# Altium integrated library Tony_Library.IntLib: 178 symbols (part 6 of 6)
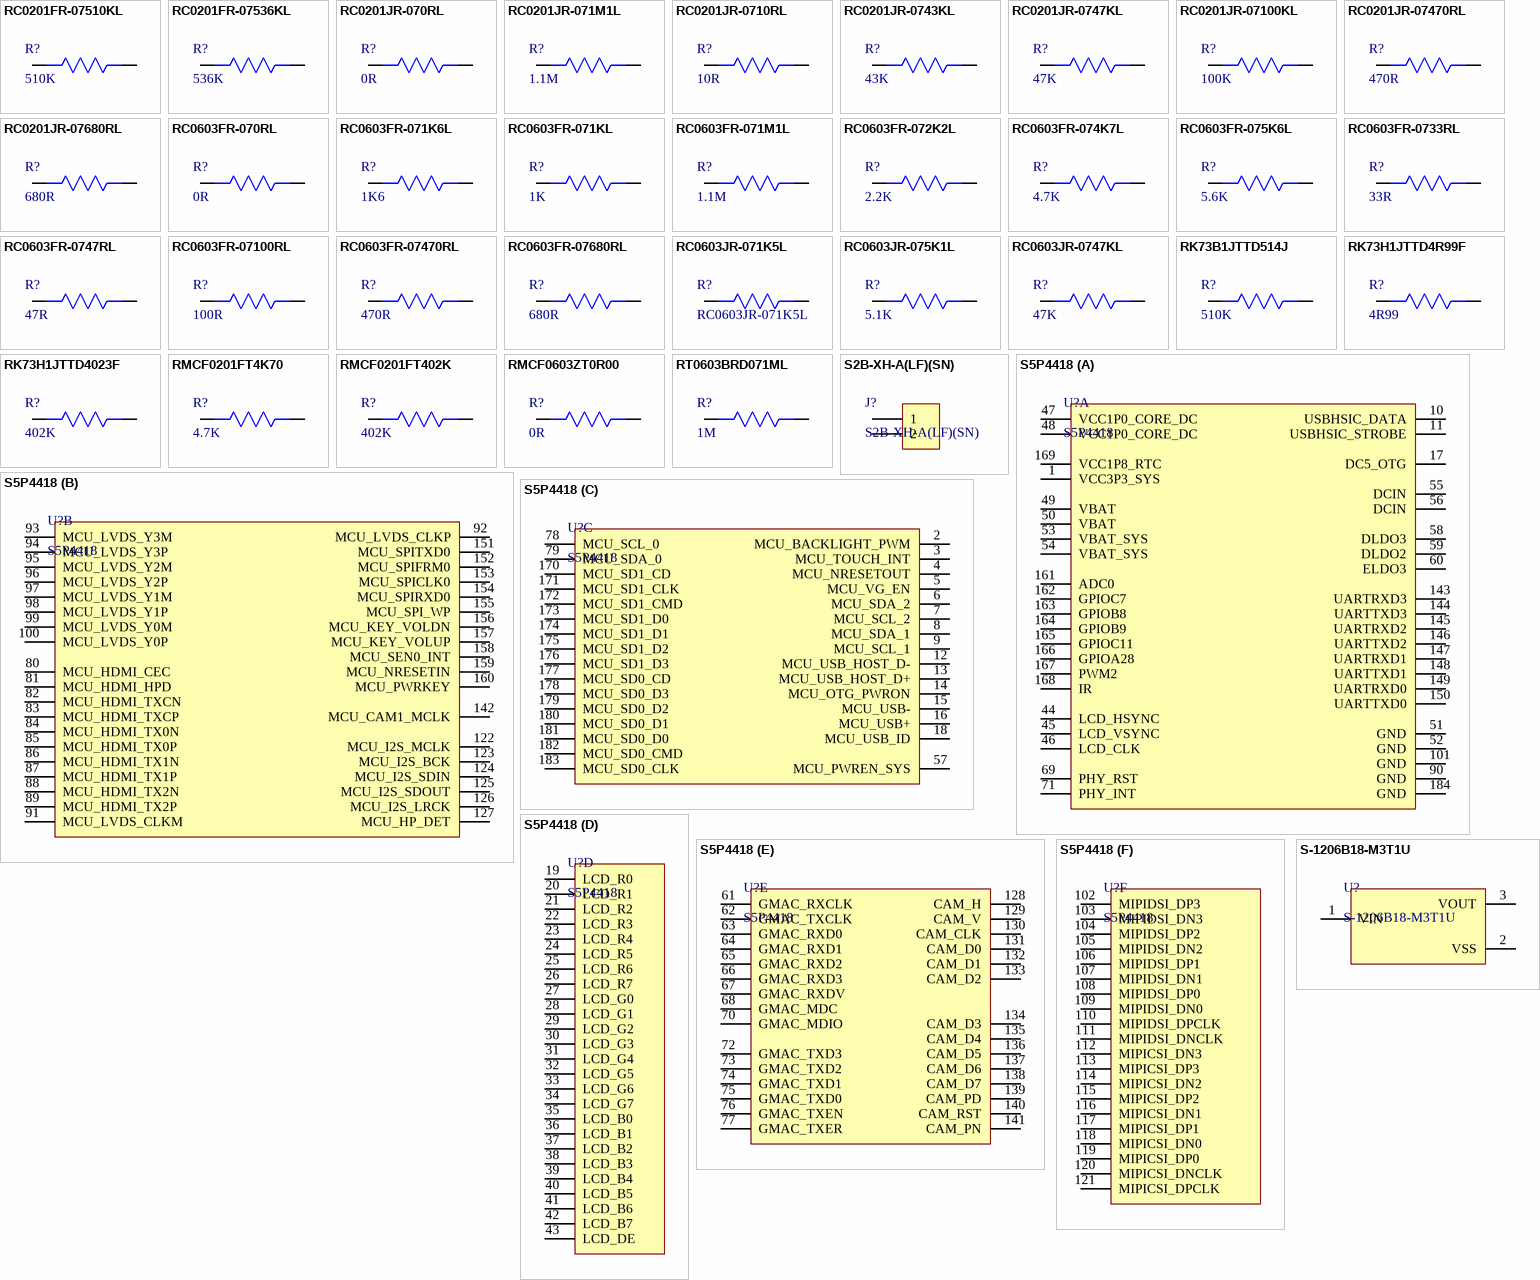
[diagram p9: symbols RC0201FR-07510KL to S-1206B18-M3T1U]

## RMCF0201FT402K
designator R?, comment 402K
RES 402K OHM 1% 1/20W 0201; Manufacturer: Stackpole Electronics; Manufacturer Part Number: RMCF0201FT402K; Resistance: 402kR; Max Power Dissipation: 50mW; Temperature Coefficient: 200ppm/°C; Supplier 1: Digi-Key; RoHS: Yes; Category: Chip SMD Resistors; Stock 1: 4361; Pricing 1: 1=0.10000, 10=0.02700, 100=0.01090, 1000=0.00488, 2500=0.00423, 5000=0.00350 (USD); Mount: Surface Mount; Case/Package: 0201; Case Code (Metric): 0603; Case Code (Imperial): 0201; Contact Plating: Tin,Matte; Min Operating Temperature: -55°C; Max Operating Temperature: 125°C; Packaging: Tape and Reel; Tolerance: 1%; Resistor Type: Thick Film; Number of Terminations: 2; Series: RMCF; Length: 0.024inch; Width: 0.012inch; Height: 0.009inch; Radiation Hardening: No; RoHS Compliant: Yes; ComponentLink1URL: https://www.seielect.com/catalog/SEI-RMCF_RMCP.pdf?src-supplier=Avnet; ComponentLink1Description: https://www.seielect.com/catalog/SEI-RMCF_RMCP.pdf?src-supplier=Avnet; ComponentLink2URL: https://www.seielect.com/Catalog/SEI-RMCF_RMCP.pdf?src-supplier=Digi-Key; ComponentLink2Description: https://www.seielect.com/Catalog/SEI-RMCF_RMCP.pdf?src-supplier=Digi-Key; Supplier Part Number 1: RMCF0201FT402KCT-ND
footprint Res-0201
pins: 1, 2

## RMCF0603ZT0R00
designator R?, comment 0R
RES 0 OHM JUMPER 1/10W 0603; Manufacturer: Stackpole Electronics; Manufacturer Part Number: RMCF0603ZT0R00; Power Rating: 100mW; Current Rating: 1A; Working Voltage: 75V; Supplier 1: Digi-Key; RoHS: Yes; Category: Chip SMD Resistors; Stock 1: 9998033; Pricing 1: 1=0.10000, 10=0.01300, 25=0.00960, 50=0.00720, 100=0.00530, 250=0.00404, 500=0.00324, 1000=0.00238 (USD); Mount: Surface Mount; Case/Package: 0603; Case Code (Metric): 1608; Case Code (Imperial): 0603; Contact Plating: Tin,Matte; Min Operating Temperature: -55°C; Max Operating Temperature: 155°C; Resistance: 0R; Packaging: Tape and Reel; Resistor Type: Thick Film; Number of Terminations: 2; Max Power Dissipation: 100mW; Features: Automotive AEC-Q200; Series: RMCF; Construction: Rectangular; Length: 1.55mm; Width: 0.031inch; Height: 0.022inch; Depth: 0.8mm; Radiation Hardening: No; Lead Free: Lead Free; Military Standard: Not; RoHS Compliant: Yes; ComponentLink1URL: https://www.seielect.com/catalog/SEI-Packaging.pdf?src-supplier=Avnet; ComponentLink1Description: https://www.seielect.com/catalog/SEI-Packaging.pdf?src-supplier=Avnet; ComponentLink2URL: https://www.seielect.com/catalog/SEI-Packaging.pdf?src-supplier=Verical; ComponentLink2Description: https://www.seielect.com/catalog/SEI-Packaging.pdf?src-supplier=Verical; ComponentLink3URL: https://www.seielect.com/catalog/SEI-Packaging.pdf?src-supplier=Digi-Key; ComponentLink3Description: https://www.seielect.com/catalog/SEI-Packaging.pdf?src-supplier=Digi-Key; ComponentLink4URL: https://www.seielect.com/Catalog/SEI-RMCF_RMCP.pdf?src-supplier=Digi-Key; ComponentLink4Description: https://www.seielect.com/Catalog/SEI-RMCF_RMCP.pdf?src-supplier=Digi-Key; ComponentLink5URL: https://www.seielect.com/catalog/SEI-Packaging.pdf?src-supplier=Arrow+Electronics; ComponentLink5Description: https://www.seielect.com/catalog/SEI-Packaging.pdf?src-supplier=Arrow+Electronics; Supplier Part Number 1: RMCF0603ZT0R00CT-ND
footprint Res0603
pins: 1, 2

## RT0603BRD071ML
designator R?, comment 1M
RES SMD 1M OHM 0.1% 1/10W 0603; Manufacturer: Yageo; Manufacturer Part Number: RT0603BRD071ML; Resistance: 1MR; Max Power Dissipation: 100mW; Temperature Coefficient: 25ppm/°C; Supplier 1: Digi-Key; Stock 1: 45971; Pricing 1: 1=0.3, 10=0.254, 100=0.0991, 1000=0.04149, 2500=0.03803 (USD); Case/Package: 0603; Min Operating Temperature: -55°C; Max Operating Temperature: 155°C; Packaging: Tape and Reel; Resistor Type: Thin Film; Number of Terminations: 2; Tolerance: 0.1%; Features: Moisture Resistant; Length: 0.063inch; Width: 0.031inch; Height: 0.022inch; RoHS Compliant: Yes; ComponentLink1URL: http://www.yageo.com/documents/recent/PYu-RT_1-to-0.01_RoHS_L_9.pdf?src-supplier=Digi-Key; ComponentLink1Description: http://www.yageo.com/documents/recent/PYu-RT_1-to-0.01_RoHS_L_9.pdf?src-supplier=Digi-Key; Supplier Part Number 1: YAG4498DKR-ND
footprint Res0603
pins: 1, 2

## S2B-XH-A(LF)(SN)
designator J?
CONN HEADER R/A 2POS 2.5MM; Manufacturer: JST; Current Rating: 3A; Contact Resistance: 20mR; Voltage Rating (AC): 250V; Number of Positions: 2; Insulation Resistance: 1GR; Gender: Male; Connector Type: Male Pin; Wire/Cable Gauge: 22AWG; Supplier 1: Digi-Key; Manufacturer Part Number: S2B-XH-A(LF)(SN); RoHS: Yes; Category: Headers and Wire Housings; Stock 1: 44898; Pricing 1: 1=0.17000, 10=0.16200, 100=0.11260, 500=0.09524, 1000=0.07792, 5000=0.06927, 10000=0.06277 (USD); Mount: Through Hole; Contact Material: Brass; Contact Plating: Tin,Copper,Lead; Color: Natural; Housing Color: White; Housing Material: Polyamide; Min Operating Temperature: -25°C; Max Operating Temperature: 85°C; Number of Rows: 1; Voltage Rating: 250V; Termination: Press-Fit; Number of Contacts: 2; Max Current Rating: 3A; Package Quantity: 1000; Packaging: Bulk; Max Voltage Rating (AC): 250V; Max Voltage Rating (DC): 250V; Orientation: Right Angle; Length: 7.4mm; Pitch: 2.5mm; Lead Pitch: 2.5mm; Depth: 11.5mm; REACH SVHC: No SVHC; Lead Free: Lead Free; ComponentLink1URL: https://datasheet.ciiva.com/16208/s2b-xh-alfsn-16208978.pdf?src-supplier=Future+Electronics; ComponentLink1Description: https://datasheet.ciiva.com/16208/s2b-xh-alfsn-16208978.pdf?src-supplier=Future+Electronics; ComponentLink2URL: https://datasheet.ciiva.com/8052/1684882-8052211.pdf?src-supplier=Element14; ComponentLink2Description: https://datasheet.ciiva.com/8052/1684882-8052211.pdf?src-supplier=Element14; ComponentLink3URL: https://datasheet.ciiva.com/11746/0900766b8082f560-11746947.pdf?src-supplier=RSComponents; ComponentLink3Description: https://datasheet.ciiva.com/11746/0900766b8082f560-11746947.pdf?src-supplier=RSComponents; ComponentLink4URL: https://datasheet.ciiva.com/26894/getdatasheetpartid-640270-26894603.pdf?src-supplier=Verical; ComponentLink4Description: https://datasheet.ciiva.com/26894/getdatasheetpartid-640270-26894603.pdf?src-supplier=Verical; ComponentLink5URL: https://datasheet.ciiva.com/26924/getdatasheetpartid-645395-26924076.pdf?src-supplier=Verical; ComponentLink5Description: https://datasheet.ciiva.com/26924/getdatasheetpartid-645395-26924076.pdf?src-supplier=Verical; ComponentLink6URL: https://datasheet.ciiva.com/26894/getdatasheetpartid-441330-26894909.pdf?src-supplier=Verical; ComponentLink6Description: https://datasheet.ciiva.com/26894/getdatasheetpartid-441330-26894909.pdf?src-supplier=Verical; ComponentLink7URL: https://datasheet.ciiva.com/726/exh-726412.pdf?src-supplier=Digi-Key; ComponentLink7Description: https://datasheet.ciiva.com/726/exh-726412.pdf?src-supplier=Digi-Key; ComponentLink8URL: https://datasheet.ciiva.com/20207/523653-20207183.pdf?src-supplier=Rapid+Electronics; ComponentLink8Description: https://datasheet.ciiva.com/20207/523653-20207183.pdf?src-supplier=Rapid+Electronics; Supplier Part Number 1: 455-2257-ND
footprint S2B-XH-A(LF)(SN)
pins: 1, 2

## S5P4418
designator U?
S5P4418 Quad Core Android SoM System on Module; Manufacturer: Samsung; Value: Custom; Manufacturer Part No: S5P4418; Package: Custom
footprint S5P4418
part A pins: 1 VCC3P3_SYS, 10 USBHSIC_DATA, 11 USBHSIC_STROBE, 17 DC5_OTG, 44 LCD_HSYNC, 45 LCD_VSYNC, 46 LCD_CLK, 47 VCC1P0_CORE_DC, 48 VCC1P0_CORE_DC, 49 VBAT, 50 VBAT, 51 GND, 52 GND, 53 VBAT_SYS, 54 VBAT_SYS, 55 DCIN, 56 DCIN, 58 DLDO3, 59 DLDO2, 60 ELDO3, 69 PHY_RST, 71 PHY_INT, 90 GND, 101 GND, 143 UARTRXD3, 144 UARTTXD3, 145 UARTRXD2, 146 UARTTXD2, 147 UARTRXD1, 148 UARTTXD1, 149 UARTRXD0, 150 UARTTXD0, 161 ADC0, 162 GPIOC7, 163 GPIOB8, 164 GPIOB9, 165 GPIOC11, 166 GPIOA28, 167 PWM2, 168 IR, 169 VCC1P8_RTC, 184 GND
part B pins: 80 MCU_HDMI_CEC, 81 MCU_HDMI_HPD, 82 MCU_HDMI_TXCN, 83 MCU_HDMI_TXCP, 84 MCU_HDMI_TX0N, 85 MCU_HDMI_TX0P, 86 MCU_HDMI_TX1N, 87 MCU_HDMI_TX1P, 88 MCU_HDMI_TX2N, 89 MCU_HDMI_TX2P, 91 MCU_LVDS_CLKM, 92 MCU_LVDS_CLKP, 93 MCU_LVDS_Y3M, 94 MCU_LVDS_Y3P, 95 MCU_LVDS_Y2M, 96 MCU_LVDS_Y2P, 97 MCU_LVDS_Y1M, 98 MCU_LVDS_Y1P, 99 MCU_LVDS_Y0M, 100 MCU_LVDS_Y0P, 122 MCU_I2S_MCLK, 123 MCU_I2S_BCK, 124 MCU_I2S_SDIN, 125 MCU_I2S_SDOUT, 126 MCU_I2S_LRCK, 127 MCU_HP_DET, 142 MCU_CAM1_MCLK, 151 MCU_SPITXD0, 152 MCU_SPIFRM0, 153 MCU_SPICLK0, 154 MCU_SPIRXD0, 155 MCU_SPI_WP, 156 MCU_KEY_VOLDN, 157 MCU_KEY_VOLUP, 158 MCU_SEN0_INT, 159 MCU_NRESETIN, 160 MCU_PWRKEY
part C pins: 2 MCU_BACKLIGHT_PWM, 3 MCU_TOUCH_INT, 4 MCU_NRESETOUT, 5 MCU_VG_EN, 6 MCU_SDA_2, 7 MCU_SCL_2, 8 MCU_SDA_1, 9 MCU_SCL_1, 12 MCU_USB_HOST_D-, 13 MCU_USB_HOST_D+, 14 MCU_OTG_PWRON, 15 MCU_USB-, 16 MCU_USB+, 18 MCU_USB_ID, 57 MCU_PWREN_SYS, 78 MCU_SCL_0, 79 MCU_SDA_0, 170 MCU_SD1_CD, 171 MCU_SD1_CLK, 172 MCU_SD1_CMD, 173 MCU_SD1_D0, 174 MCU_SD1_D1, 175 MCU_SD1_D2, 176 MCU_SD1_D3, 177 MCU_SD0_CD, 178 MCU_SD0_D3, 179 MCU_SD0_D2, 180 MCU_SD0_D1, 181 MCU_SD0_D0, 182 MCU_SD0_CMD, 183 MCU_SD0_CLK
part D pins: 19 LCD_R0, 20 LCD_R1, 21 LCD_R2, 22 LCD_R3, 23 LCD_R4, 24 LCD_R5, 25 LCD_R6, 26 LCD_R7, 27 LCD_G0, 28 LCD_G1, 29 LCD_G2, 30 LCD_G3, 31 LCD_G4, 32 LCD_G5, 33 LCD_G6, 34 LCD_G7, 35 LCD_B0, 36 LCD_B1, 37 LCD_B2, 38 LCD_B3, 39 LCD_B4, 40 LCD_B5, 41 LCD_B6, 42 LCD_B7, 43 LCD_DE
part E pins: 61 GMAC_RXCLK, 62 GMAC_TXCLK, 63 GMAC_RXD0, 64 GMAC_RXD1, 65 GMAC_RXD2, 66 GMAC_RXD3, 67 GMAC_RXDV, 68 GMAC_MDC, 70 GMAC_MDIO, 72 GMAC_TXD3, 73 GMAC_TXD2, 74 GMAC_TXD1, 75 GMAC_TXD0, 76 GMAC_TXEN, 77 GMAC_TXER, 128 CAM_H, 129 CAM_V, 130 CAM_CLK, 131 CAM_D0, 132 CAM_D1, 133 CAM_D2, 134 CAM_D3, 135 CAM_D4, 136 CAM_D5, 137 CAM_D6, 138 CAM_D7, 139 CAM_PD, 140 CAM_RST, 141 CAM_PN
part F pins: 102 MIPIDSI_DP3, 103 MIPIDSI_DN3, 104 MIPIDSI_DP2, 105 MIPIDSI_DN2, 106 MIPIDSI_DP1, 107 MIPIDSI_DN1, 108 MIPIDSI_DP0, 109 MIPIDSI_DN0, 110 MIPIDSI_DPCLK, 111 MIPIDSI_DNCLK, 112 MIPICSI_DN3, 113 MIPICSI_DP3, 114 MIPICSI_DN2, 115 MIPICSI_DP2, 116 MIPICSI_DN1, 117 MIPICSI_DP1, 118 MIPICSI_DN0, 119 MIPICSI_DP0, 120 MIPICSI_DNCLK, 121 MIPICSI_DPCLK

## S-1206B18-M3T1U
designator U?
IC REG LINEAR 1.8V 250MA SOT23-3; Manufacturer: ABLIC; Supplier 1: Digi-Key; Manufacturer Part Number: S-1206B18-M3T1U; Stock 1: 577; Pricing 1: 1=0.92000, 10=0.80800, 25=0.75960, 100=0.57580, 250=0.49000, 500=0.46550 (USD); Supplier Part Number 1: 1662-1438-1-ND
footprint SOT-23 (TRANS NPN 40V 0.6A SOT23)
pins: 1 VIN, 2 VSS, 3 VOUT

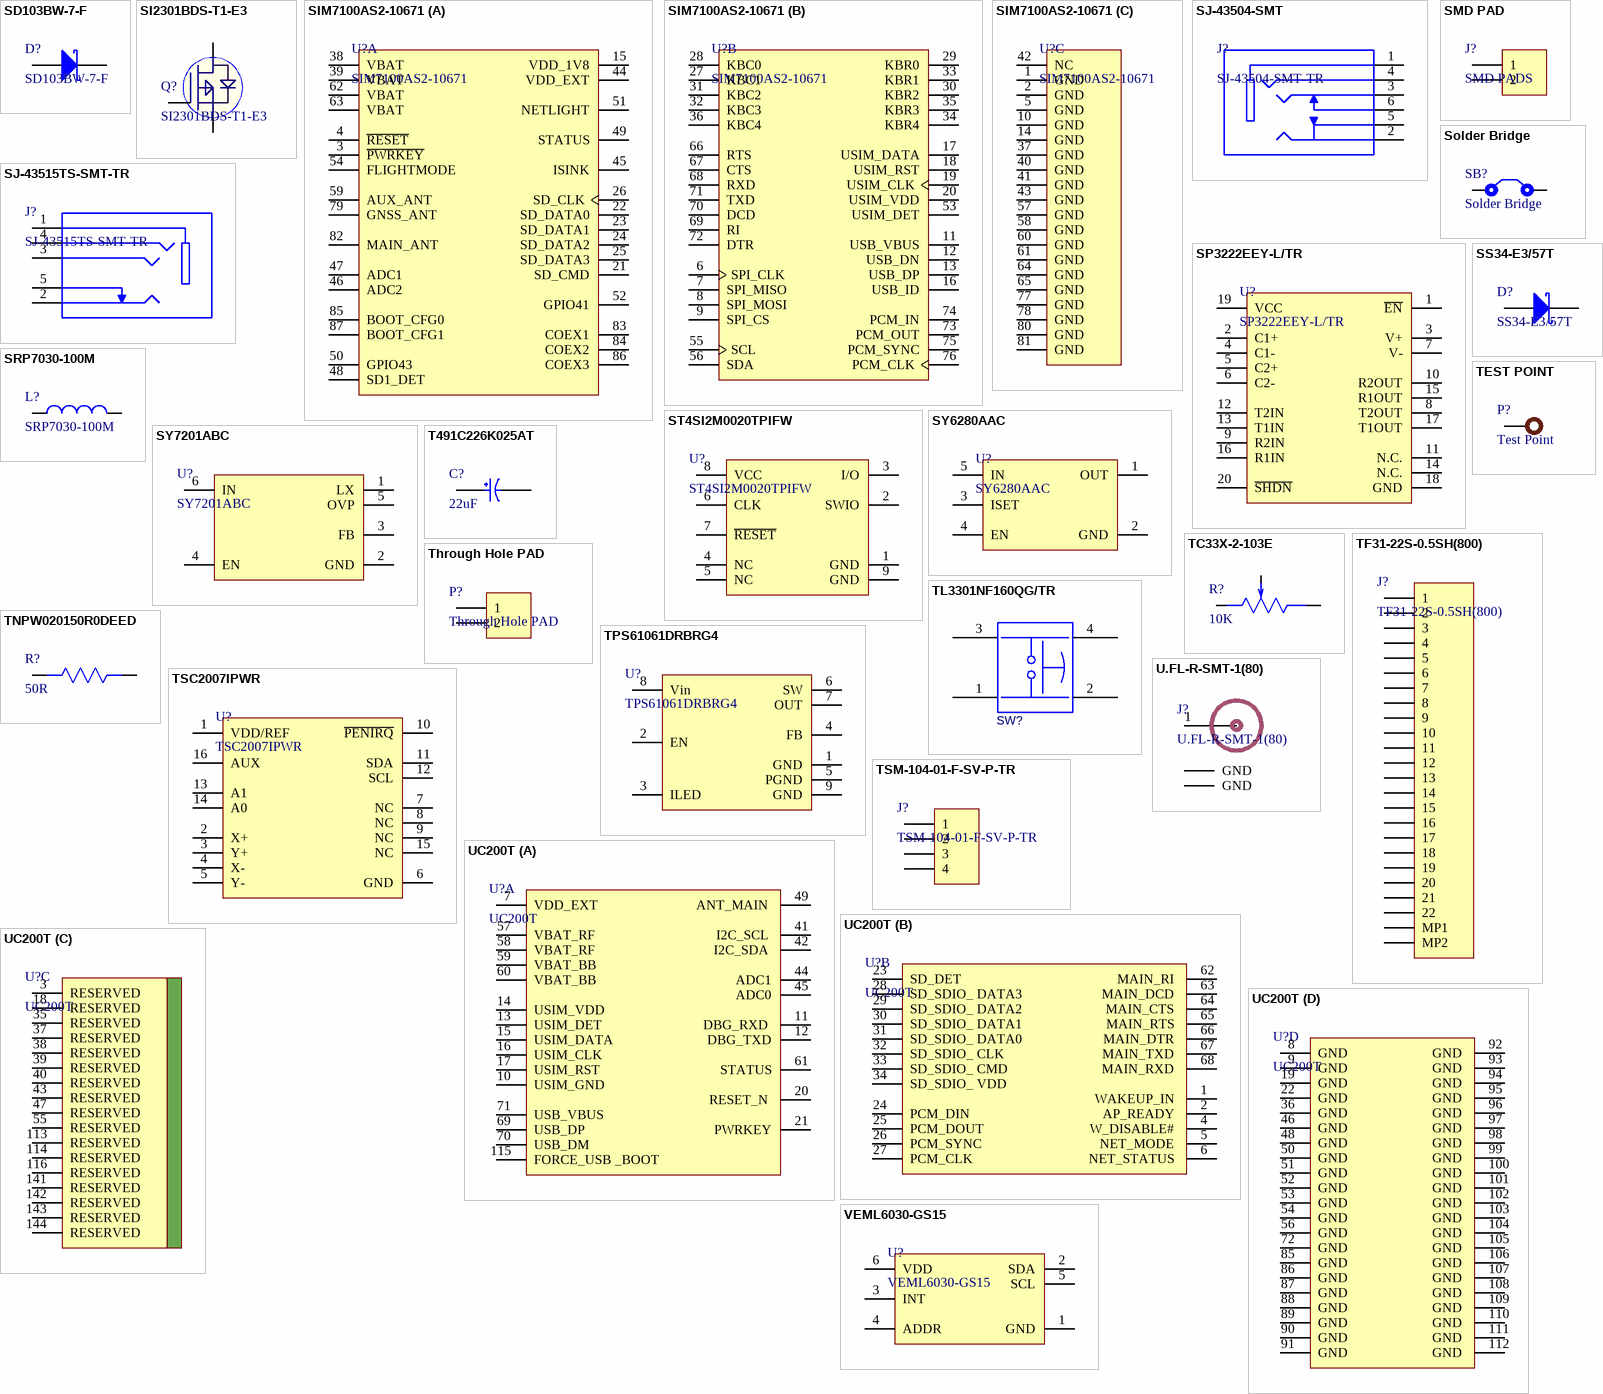
[diagram p4: symbols SD103BW-7-F to VEML6030-GS15]

## SD103BW-7-F
designator D?
Diode Schottky 30V 0.35A 2-Pin SOD-123 T/R; Manufacturer: Diodes; Forward Current: 350mA; Peak Non-Repetitive Surge Current: 1.5A; Element Configuration: Single; Forward Voltage: 600mV; Max Power Dissipation: 400mW; Reverse Recovery Time: 10ns; Max Reverse Current: 5uA; Supplier 1: Digi-Key; Manufacturer Part Number: SD103BW-7-F; RoHS: Yes; Category: Rectifier Diodes; Stock 1: 2033; Pricing 1: 1=0.44000, 10=0.32400, 100=0.18340, 500=0.12144, 1000=0.09310 (USD); Mount: Surface Mount; Number of Pins: 2; Weight: 0.000353oz; Min Operating Temperature: -65°C; Max Operating Temperature: 125°C; Max Repetitive Reverse Voltage (Vrrm): 30V; Package Quantity: 3000; Packaging: Tape and Reel; Average Rectified Current: 350mA; Power Dissipation: 400mW; Max Forward Surge Current (Ifsm): 1.5A; Termination: SMD/SMT; Power Rating: 400mW; Max Reverse Voltage (DC): 30V; Series: -; Length: 2.85mm; Width: 1.7mm; Height: 1.25mm; Radiation Hardening: No; REACH SVHC: No SVHC; Lead Free: Lead Free; RoHS Compliant: Yes; ComponentLink1URL: https://datasheet.ciiva.com/36526/1541925-36526008.pdf?src-supplier=Jameco; ComponentLink1Description: https://datasheet.ciiva.com/36526/1541925-36526008.pdf?src-supplier=Jameco; ComponentLink2URL: https://datasheet.ciiva.com/912/ds11013-912934.pdf?src-supplier=Digi-Key; ComponentLink2Description: https://datasheet.ciiva.com/912/ds11013-912934.pdf?src-supplier=Digi-Key; ComponentLink3URL: https://datasheet.ciiva.com/912/ds11013-912935.pdf?src-supplier=Digi-Key; ComponentLink3Description: https://datasheet.ciiva.com/912/ds11013-912935.pdf?src-supplier=Digi-Key; ComponentLink4URL: https://datasheet.ciiva.com/16574/ds11013-16574365.pdf?src-supplier=Avnet+Europe; ComponentLink4Description: https://datasheet.ciiva.com/16574/ds11013-16574365.pdf?src-supplier=Avnet+Europe; ComponentLink5URL: https://datasheet.ciiva.com/22695/480042-22695847.pdf?src-supplier=Element14; ComponentLink5Description: https://datasheet.ciiva.com/22695/480042-22695847.pdf?src-supplier=Element14; ComponentLink6URL: https://datasheet.ciiva.com/7964/ds11013-7964329.pdf?src-supplier=Element14; ComponentLink6Description: https://datasheet.ciiva.com/7964/ds11013-7964329.pdf?src-supplier=Element14; Supplier Part Number 1: SD103BW-7-FDICT-ND
footprint SOD-123
pins: 1 K, 2 A

## SI2301BDS-T1-E3
designator Q?
MOSFET 20V 2.0A 0.9W; Manufacturer: Vishay; Manufacturer Part Number: SI2301BDST1E3; Nominal Vgs: -950mV; Rds On Max: 100mR; Input Capacitance: 375pF; Rise Time: 40ns; Number of Elements: 1; Max Power Dissipation: 900mW; Continuous Drain Current (ID): 2.4A; Gate to Source Voltage (Vgs): 4.5V; Fall Time: 20ns; Turn-Off Delay Time: 30ns; Power Dissipation: 700mW; Element Configuration: Single; Drain to Source Breakdown Voltage: -20V; Polarity: P-CHANNEL; Supplier 1: Digi-Key; RoHS: Yes; Category: MOSFETs; Stock 1: 51394; Pricing 1: 1=0.42000, 10=0.34100, 100=0.23230, 500=0.17424, 1000=0.13068 (USD); Mount: Surface Mount; Case/Package: SOT-23-3; Number of Pins: 3; Weight: 0.000282oz; Contact Plating: Tin,Matte; Min Operating Temperature: -55°C; Max Operating Temperature: 150°C; Package Quantity: 3000; Packaging: Cut Tape; Drain to Source Voltage (Vdss): 20V; Drain to Source Resistance: 100mR; Threshold Voltage: -950mV; Turn-On Delay Time: 20ns; Number of Channels: 1; On-State Resistance: 100MR; Series: SI2; Length: 2.9mm; Width: 1.6mm; Height: 1.45mm; Radiation Hardening: No; REACH SVHC: Unknown; Lead Free: Lead Free; ComponentLink1URL: https://datasheet.ciiva.com/7789/110460-7789013.pdf?src-supplier=Element14; ComponentLink1Description: https://datasheet.ciiva.com/7789/110460-7789013.pdf?src-supplier=Element14; ComponentLink2URL: https://datasheet.ciiva.com/34303/1926622-34303264.pdf?src-supplier=Jameco; ComponentLink2Description: https://datasheet.ciiva.com/34303/1926622-34303264.pdf?src-supplier=Jameco; ComponentLink3URL: https://datasheet.ciiva.com/28603/1763316-28603469.pdf?src-supplier=Element14; ComponentLink3Description: https://datasheet.ciiva.com/28603/1763316-28603469.pdf?src-supplier=Element14; ComponentLink4URL: https://datasheet.ciiva.com/16199/si2301bds-t1-e3-16199268.pdf?src-supplier=Future+Electronics; ComponentLink4Description: https://datasheet.ciiva.com/16199/si2301bds-t1-e3-16199268.pdf?src-supplier=Future+Electronics; ComponentLink5URL: https://datasheet.ciiva.com/26790/si2301bds-t1-e3-26790619.pdf?src-supplier=IIIC; ComponentLink5Description: https://datasheet.ciiva.com/26790/si2301bds-t1-e3-26790619.pdf?src-supplier=IIIC; ComponentLink6URL: https://datasheet.ciiva.com/18433/70026063-18433994.pdf?src-supplier=Allied+Electronics; ComponentLink6Description: https://datasheet.ciiva.com/18433/70026063-18433994.pdf?src-supplier=Allied+Electronics; ComponentLink7URL: https://datasheet.ciiva.com/11161/si2301bds-11161447.pdf?src-supplier=Avnet; ComponentLink7Description: https://datasheet.ciiva.com/11161/si2301bds-11161447.pdf?src-supplier=Avnet; ComponentLink8URL: https://datasheet.ciiva.com/26139/si2301bds-26139129.pdf?src-supplier=Avnet+Europe; ComponentLink8Description: https://datasheet.ciiva.com/26139/si2301bds-26139129.pdf?src-supplier=Avnet+Europe; ComponentLink9URL: https://datasheet.ciiva.com/6367/si2301bds-6367030.pdf?src-supplier=Digi-Key; ComponentLink9Description: https://datasheet.ciiva.com/6367/si2301bds-6367030.pdf?src-supplier=Digi-Key; ComponentLink10URL: https://datasheet.ciiva.com/6367/si2301bds-6367033.pdf?src-supplier=Digi-Key; ComponentLink10Description: https://datasheet.ciiva.com/6367/si2301bds-6367033.pdf?src-supplier=Digi-Key; Supplier Part Number 1: SI2301BDS-T1-E3CT-ND
footprint SI2301BDS-T1-E3 (SOT-23-3(TO-236) MOSFETs ROHS)
pins: 1 G, 2 S, 3 D

## SIM7100AS2-10671
designator U?
RF Components; MF: Simcom; SnapEDA_Link: https://www.snapeda.com/parts/SIM7100A%20S2-10671/SIMcom%20Wireless%20solutions%20Co.%2CLtd/view-part/796159/?ref=snap; Price: None; Value: *; MP: SIM7100A S2-10671; Package: None; Availability: Unavailable
footprint SIM7100AS2-10671
part A pins: 3 ~{PWRKEY}, 4 ~{RESET}, 15 VDD_1V8, 21 SD_CMD, 22 SD_DATA0, 23 SD_DATA1, 24 SD_DATA2, 25 SD_DATA3, 26 SD_CLK, 38 VBAT, 39 VBAT, 44 VDD_EXT, 45 ISINK, 46 ADC2, 47 ADC1, 48 SD1_DET, 49 STATUS, 50 GPIO43, 51 NETLIGHT, 52 GPIO41, 54 FLIGHTMODE, 59 AUX_ANT, 62 VBAT, 63 VBAT, 79 GNSS_ANT, 82 MAIN_ANT, 83 COEX1, 84 COEX2, 85 BOOT_CFG0, 86 COEX3, 87 BOOT_CFG1
part B pins: 6 SPI_CLK, 7 SPI_MISO, 8 SPI_MOSI, 9 SPI_CS, 11 USB_VBUS, 12 USB_DN, 13 USB_DP, 16 USB_ID, 17 USIM_DATA, 18 USIM_RST, 19 USIM_CLK, 20 USIM_VDD, 27 KBC1, 28 KBC0, 29 KBR0, 30 KBR2, 31 KBC2, 32 KBC3, 33 KBR1, 34 KBR4, 35 KBR3, 36 KBC4, 53 USIM_DET, 55 SCL, 56 SDA, 66 RTS, 67 CTS, 68 RXD, 69 RI, 70 DCD, 71 TXD, 72 DTR, 73 PCM_OUT, 74 PCM_IN, 75 PCM_SYNC, 76 PCM_CLK
part C pins: 1 GND (power), 2 GND (power), 5 GND (power), 10 GND (power), 14 GND (power), 37 GND (power), 40 GND (power), 41 GND (power), 42 NC, 43 GND (power), 57 GND (power), 58 GND (power), 60 GND (power), 61 GND (power), 64 GND (power), 65 GND (power), 77 GND (power), 78 GND (power), 80 GND (power), 81 GND (power)

## SJ-43504-SMT
designator J?, comment SJ-43504-SMT-TR
CONN JACK 4COND 3.5MM SMD R/A; Manufacturer: CUI; Body Material: Brass; Body Color: Black; Gender: Female; Shielding: Shielded; Current Rating: 1A; Number of Conductors: 4; Number of Ports: 1; Supplier 1: Digi-Key; Manufacturer Part Number: SJ-43504-SMT-TR; RoHS: Yes; Category: Connectors; Stock 1: 13818; Pricing 1: 1=1.14000, 10=1.00500, 25=0.94560, 50=0.90620, 100=0.86680, 250=0.78800, 500=0.70920 (USD); Mount: Surface Mount,Board; Case/Package: SMD/SMT; Contact Plating: Gold; Color: Black; Packaging: Tape and Reel; Termination: Solder; Connector Type: Jack; Orientation: Horizontal; Series: -; Lead Free: Lead Free; RoHS Compliant: Yes; ComponentLink1URL: http://www.cui.com/product/resource/digikeypdf/sj-43504-smt.pdf?src-supplier=Digi-Key; ComponentLink1Description: http://www.cui.com/product/resource/digikeypdf/sj-43504-smt.pdf?src-supplier=Digi-Key; ComponentLink2URL: https://www.cui.com/product/resource/digikeypdf/sj-43504-smt-tr.pdf?src-supplier=Digi-Key; ComponentLink2Description: https://www.cui.com/product/resource/digikeypdf/sj-43504-smt-tr.pdf?src-supplier=Digi-Key; Supplier Part Number 1: CP-43504SJCT-ND
footprint SJ-43504-SMT-TR (CONN JACK 4COND 3.5MM SMD R/A)
pins: 1, 2, 3, 4, 5, 6

## SJ-43515TS-SMT-TR
designator J?
CONN JACK 4COND 3.5MM SMD R/A; Manufacturer: CUI; Body Color: Black; Current Rating: 1A; Gender: Female; Shielding: Unshielded; Number of Conductors: 4; Number of Ports: 1; Supplier 1: Digi-Key; Manufacturer Part Number: SJ-43515TS-SMT-TR; RoHS: Yes; Category: Connectors; Stock 1: 51087; Pricing 1: 1=1.07000, 10=0.90600, 25=0.86960, 50=0.85100, 100=0.81400, 250=0.74000, 500=0.66600 (USD); Mount: Surface Mount; Case/Package: SMD/SMT; Contact Plating: Silver; Color: Black; Packaging: Cut Tape; Termination: Solder; Connector Type: Jack; Orientation: Horizontal; Series: SJ; Lead Free: Lead Free; RoHS Compliant: Yes; ComponentLink1URL: https://datasheet.ciiva.com/7368/sj-4351x-smt-series-7368789.pdf?src-supplier=Digi-Key; ComponentLink1Description: https://datasheet.ciiva.com/7368/sj-4351x-smt-series-7368789.pdf?src-supplier=Digi-Key; ComponentLink2URL: https://datasheet.ciiva.com/7368/sj-4351x-smt-series-7368776.pdf?src-supplier=Digi-Key; ComponentLink2Description: https://datasheet.ciiva.com/7368/sj-4351x-smt-series-7368776.pdf?src-supplier=Digi-Key; ComponentLink3URL: https://datasheet.ciiva.com/16215/sj-4351x-smt-series-16215052.pdf?src-supplier=Future+Electronics; ComponentLink3Description: https://datasheet.ciiva.com/16215/sj-4351x-smt-series-16215052.pdf?src-supplier=Future+Electronics; Supplier Part Number 1: CP-43515TSSJCT-ND
footprint SJ-43515TS-SMT-TR
pins: 1, 2, 3, 4, 5

## SMD PAD
designator J?, comment SMD PADS
footprint SMD PAD (SMD 0805)
pins: 1, 2

## Solder Bridge
designator SB?
Solder Bridge ON
footprint Solder Bridge (Solder Bridge ON)
pins: 1, 2

## SP3222EEY-L/TR
designator U?
IC TRANSCEIVER FULL 2/2 20TSSOP; Manufacturer: MaxLinear; Supplier 1: Digi-Key; Manufacturer Part Number: SP3222EEY-L/TR; RoHS: Yes; Category: Interface ICs; Stock 1: 1669; Pricing 1: 1=1.75000, 10=1.57600, 25=1.48680, 100=1.26660, 250=1.18932, 500=1.04066, 1000=0.86226 (USD); RoHS Compliant: Yes; Supplier Part Number 1: 1016-1794-1-ND
footprint 20-TSSOP
pins: 1 ~{EN}, 2 C1+, 3 V+, 4 C1-, 5 C2+, 6 C2-, 7 V-, 8 T2OUT, 9 R2IN, 10 R2OUT, 11 N.C., 12 T2IN, 13 T1IN, 14 N.C., 15 R1OUT, 16 R1IN, 17 T1OUT, 18 GND, 19 VCC, 20 ~{SHDN}

## SRP7030-100M
designator L?
FIXED IND 10UH 3A 85 MOHM SMD; Manufacturer: Bourns; Core Material: Ferrite; Saturation Current: 5A; Tolerance: 20%; Shielding: Shielded; Resistance: 85MR; Test Frequency: 100kHz; RMS Current (Irms): 3.5A; ComponentLink1URL: http://uk.rs-online.com/webdocs/13c1/0900766b813c1de5.pdf?src-supplier=RSComponents; ComponentLink1Description: http://uk.rs-online.com/webdocs/13c1/0900766b813c1de5.pdf?src-supplier=RSComponents; ComponentLink2URL: https://www.alliedelec.com/m/d/5e741480322ef59d41c75b67a1ae1fb6.pdf?src-supplier=Allied+Electronics; ComponentLink2Description: https://www.alliedelec.com/m/d/5e741480322ef59d41c75b67a1ae1fb6.pdf?src-supplier=Allied+Electronics; ComponentLink3URL: http://www.farnell.com/datasheets/1880727.pdf?src-supplier=Element14; ComponentLink3Description: http://www.farnell.com/datasheets/1880727.pdf?src-supplier=Element14; ComponentLink4URL: http://www.epcos.com/inf/30/db/ind_2008/b82422h.pdf?src-supplier=Future+Electronics; ComponentLink4Description: http://www.epcos.com/inf/30/db/ind_2008/b82422h.pdf?src-supplier=Future+Electronics; ComponentLink5URL: http://www.produktinfo.conrad.com/datenblaetter/1000000-1099999/001092469-da-01-en-SMT_INDUKTIVITAET_B82422H1222K000_2000_S.pdf?src-supplier=Conrad; ComponentLink5Description: http://www.produktinfo.conrad.com/datenblaetter/1000000-1099999/001092469-da-01-en-SMT_INDUKTIVITAET_B82422H1222K000_2000_S.pdf?src-supplier=Conrad; Supplier 1: Digi-Key; Manufacturer Part Number: SRP7030-100M; Stock 1: 4075; Pricing 1: 1=1.49, 10=1.383, 100=0.9999, 500=0.7659 (USD); Mount: Surface Mount; Case/Package: 7030; Number of Pins: 2; Material: Ferrite; Min Operating Temperature: -55°C; Max Operating Temperature: 150°C; Package Quantity: 1000; Current Rating: 3A; Packaging: Tape and Reel; Inductance Tolerance: 20%; Composition: Wirewound; Inductance: 10uH; DC Resistance (DCR): 85mR; Max DC Current: 3A; Termination: SMD/SMT; DC Current: 3A; Military Standard: Not; Length: 7.8mm; Height: 3.2mm; Width: 7mm; Height - Seated (Max): 0.126inch; Depth: 7mm; Radiation Hardening: No; REACH SVHC: No SVHC; ComponentLink6URL: http://www.bourns.com/docs/Product-Datasheets/SRP7030.pdf?src-supplier=Digi-Key; ComponentLink6Description: http://www.bourns.com/docs/Product-Datasheets/SRP7030.pdf?src-supplier=Digi-Key; ComponentLink7URL: http://www.mouser.com/ds/2/54/SRP7030-33303.pdf?src-supplier=Mouser; ComponentLink7Description: http://www.mouser.com/ds/2/54/SRP7030-33303.pdf?src-supplier=Mouser; ComponentLink8URL: http://www.farnell.com/datasheets/1837085.pdf?src-supplier=Element14; ComponentLink8Description: http://www.farnell.com/datasheets/1837085.pdf?src-supplier=Element14; ComponentLink9URL: http://components.arrow.com/part/dataview/42910260S8817865N1506?src-supplier=Arrow; ComponentLink9Description: http://components.arrow.com/part/dataview/42910260S8817865N1506?src-supplier=Arrow; ComponentLink10URL: http://bourns.com/pdfs/SRP7030.pdf?src-supplier=Avnet+Europe; ComponentLink10Description: http://bourns.com/pdfs/SRP7030.pdf?src-supplier=Avnet+Europe; ComponentLink11URL: https://www.bourns.com/docs/Product-Datasheets/SRP7030.pdf?src-supplier=Digi-Key; ComponentLink11Description: https://www.bourns.com/docs/Product-Datasheets/SRP7030.pdf?src-supplier=Digi-Key; Supplier Part Number 1: SRP7030-100MCT-ND
footprint SRP7030-100M (FIXED IND 10UH 3A 85 MOHM SMD)
pins: 1, 2

## SS34-E3/57T
designator D?
DIODE SCHOTTKY 40V 3A DO214AB; Manufacturer: Vishay Semiconductors; Max Reverse Current: 500uA; Element Configuration: Single; Max Forward Surge Current (Ifsm): 100A; Polarity: Standard; Forward Voltage: 500mV; Supplier 1: Avnet; Manufacturer Part Number: SS34-E3/57T; RoHS: Yes; Category: Rectifier Diodes; Stock 1: 850; Pricing 1: 850=0.23754, 1700=0.19495, 3400=0.19341, 5100=0.19188, 6800=0.19034, 8500=0.18881, 85000=0.18727 (USD); Mount: Surface Mount; Case/Package: SMC; Number of Pins: 2; Contact Plating: Tin,Matte; Min Operating Temperature: -55°C; Max Operating Temperature: 125°C; Packaging: Tape and Reel; Forward Current: 3A; Max Repetitive Reverse Voltage (Vrrm): 40V; Voltage Rating (DC): 40V; Current Rating: 3A; Output Current: 3A; Max Surge Current: 100A; Package Quantity: 1; Average Rectified Current: 3A; Max Reverse Leakage Current: 500uA; Peak Non-Repetitive Surge Current: 100A; Max Reverse Voltage (DC): 40V; Current: 3A; Voltage: 40V; Length: 7.11mm; Width: 6.22mm; Height: 2.417mm; Radiation Hardening: No; Lead Free: Lead Free; REACH SVHC: Unknown; Supplier Part Number 1: SS34-E3/57T
footprint SMC
pins: 1 K, 2 A

## ST4SI2M0020TPIFW
designator U?
GSMA ESIM SYSTEM-ON-CHIP FOR SEC; Manufacturer: STMicroelectronics; Supplier 1: Digi-Key; Manufacturer Part Number: ST4SI2M0020TPIFW; RoHS: No; Category: Integrated Circuits (ICs); Stock 1: 10; Pricing 1: 1=5.72000, 10=5.14100, 25=4.86000, 100=4.21200, 250=3.99600, 500=3.58560 (USD); Supplier Part Number 1: 497-ST4SI2M0020TPIFWCT-ND
footprint ST4SI2M0020TPIFW (GSMA ESIM SYSTEM-ON-CHIP FOR SEC)
pins: 1 GND, 2 SWIO, 3 I/O, 4 NC, 5 NC, 6 CLK, 7 ~{RESET}, 8 VCC, 9 GND

## SY6280AAC
designator U?
SOT-23-5 PMIC - Power Distribution Switches RoHS; Manufacturer: Silergy Corp; Value: Custom; Manufacturer Part No: SY6280AAC; Package: SOT-23-5
footprint SOT23-5 (SOT23-5 Package)
pins: 1 OUT, 2 GND, 3 ISET, 4 EN, 5 IN

## SY7201ABC
designator U?
Led Drvr Boost 1-CH Pwm 6-PIN SOT-23 T/r; Manufacturer: Silergy; Supplier 1: Avnet; Manufacturer Part Number: SY7201ABC; RoHS: No; Category: LED Drivers; Supplier Part Number 1: SY7201ABC
footprint SY7201ABC (SOT-23-6 LED Drivers ROHS)
pins: 1 LX, 2 GND, 3 FB, 4 EN, 5 OVP, 6 IN

## T491C226K025AT
designator C?, comment 22uF
CAP TANT 22UF 10% 25V 2312; Manufacturer: KEMET; Manufacturer Part Number: T491C226K025AT; Dielectric Material: Tantalum; ESR (Equivalent Series Resistance): 1.4R; Life (Hours): 2000Hour; Ripple Current: 280mA; Leakage Current: 5.5uA; Dissipation Factor: 6%; Polarity: Polar; Supplier 1: Digi-Key; Stock 1: 17993; Pricing 1: 1=0.82, 10=0.626, 100=0.4479 (USD); Mount: Surface Mount,PCB; Case/Package: Molded; Number of Pins: 2; Case Code (Metric): 6032; Case Code (Imperial): 2412; Min Operating Temperature: -55°C; Max Operating Temperature: 125°C; Capacitance: 22uF; Tolerance: 10%; Voltage Rating: 25V; Packaging: Tape and Reel; Features: General Purpose; Package Quantity: 1; Voltage Rating (DC): 25V; Termination: SMD/SMT; Voltage: 25V; Length: 6mm; Height: 2.5mm; Width: 0.126inch; Depth: 3.2mm; Height - Seated (Max): 0.11inch; Lead Pitch: 2.9mm; Radiation Hardening: No; Lead Free: Lead Free; REACH SVHC: No SVHC; ComponentLink1URL: https://search.kemet.com/component-edge/download/datasheet/T491C226K025AT.pdf?src-supplier=Digi-Key; ComponentLink1Description: https://search.kemet.com/component-edge/download/datasheet/T491C226K025AT.pdf?src-supplier=Digi-Key; ComponentLink2URL: http://www.jameco.com/Jameco/Products/ProdDS/1573951.pdf?src-supplier=Jameco; ComponentLink2Description: http://www.jameco.com/Jameco/Products/ProdDS/1573951.pdf?src-supplier=Jameco; ComponentLink3URL: https://www.alliedelec.com/m/d/1172a60f7bb3eb66344f86e8fb9ddbde.pdf?src-supplier=Allied+Electronics; ComponentLink3Description: https://www.alliedelec.com/m/d/1172a60f7bb3eb66344f86e8fb9ddbde.pdf?src-supplier=Allied+Electronics; ComponentLink4URL: http://www.farnell.com/datasheets/1698764.pdf?src-supplier=Element14; ComponentLink4Description: http://www.farnell.com/datasheets/1698764.pdf?src-supplier=Element14; ComponentLink5URL: https://api.kemet.com/component-edge/download/datasheet/T491C226K025AT.pdf?src-supplier=Digi-Key; ComponentLink5Description: https://api.kemet.com/component-edge/download/datasheet/T491C226K025AT.pdf?src-supplier=Digi-Key; ComponentLink6URL: http://www.farnell.com/datasheets/1923792.pdf?src-supplier=Element14; ComponentLink6Description: http://www.farnell.com/datasheets/1923792.pdf?src-supplier=Element14; ComponentLink7URL: https://www.distrelec.biz/Web/Downloads/_t/ds/KEM_T2005_T491_eng_tds.pdf?mime=application%2Fpdf&src-supplier=Distrelec; ComponentLink7Description: https://www.distrelec.biz/Web/Downloads/_t/ds/KEM_T2005_T491_eng_tds.pdf?mime=application%2Fpdf&src-supplier=Distrelec; Supplier Part Number 1: 399-3746-1-ND
footprint T491C226K025AT
pins: 1, 2

## TC33X-2-103E
designator R?, comment 10K
TRIMMER 10K OHM 0.1W J LEAD TOP; Manufacturer: Bourns; Manufacturer Part Number: TC33X-2-103E; Tolerance: 25%; Resistance: 10kR; Number of Turns: 1; Power Rating: 100mW; Temperature Coefficient: 250ppm/°C; Voltage Rating (DC): 50V; Supplier 1: Digi-Key; RoHS: Yes; Category: Variable Resistors and Potentiometers; Stock 1: 84845; Pricing 1: 1=0.26000, 10=0.25200, 25=0.22760, 50=0.21700, 100=0.21000, 250=0.19600, 500=0.17850, 1000=0.16100 (USD); Mount: Surface Mount; Color: Silver; Weight: 29.4mg; Contact Plating: Copper,Tin,Silver; Min Operating Temperature: -40°C; Max Operating Temperature: 100°C; Packaging: Tape and Reel; Package Quantity: 2500; Resistor Type: Cermet; Termination: Foot Print; Taper: Linear; Max Power Dissipation: 100mW; Series: TC33; Resistance Tolerance: 25%; Length: 3mm; Width: 0.118inch; Height: 0.047inch; Depth: 3.8mm; Radiation Hardening: No; REACH SVHC: No SVHC; Military Standard: Not; Lead Free: Lead Free; RoHS Compliant: Yes; ComponentLink1URL: https://datasheet.ciiva.com/11830/0900766b802749b3-11830705.pdf?src-supplier=RSComponents; ComponentLink1Description: https://datasheet.ciiva.com/11830/0900766b802749b3-11830705.pdf?src-supplier=RSComponents; ComponentLink2URL: https://datasheet.ciiva.com/7953/1818686-7953349.pdf?src-supplier=Element14; ComponentLink2Description: https://datasheet.ciiva.com/7953/1818686-7953349.pdf?src-supplier=Element14; ComponentLink3URL: https://datasheet.ciiva.com/26944/getdatasheetpartid-183773-26944166.pdf?src-supplier=Verical; ComponentLink3Description: https://datasheet.ciiva.com/26944/getdatasheetpartid-183773-26944166.pdf?src-supplier=Verical; ComponentLink4URL: https://datasheet.ciiva.com/2155/tc33-2155962.pdf?src-supplier=Digi-Key; ComponentLink4Description: https://datasheet.ciiva.com/2155/tc33-2155962.pdf?src-supplier=Digi-Key; ComponentLink5URL: https://datasheet.ciiva.com/2155/tc33-2155963.pdf?src-supplier=Digi-Key; ComponentLink5Description: https://datasheet.ciiva.com/2155/tc33-2155963.pdf?src-supplier=Digi-Key; ComponentLink6URL: https://datasheet.ciiva.com/2155/tc33-2155964.pdf?src-supplier=Digi-Key; ComponentLink6Description: https://datasheet.ciiva.com/2155/tc33-2155964.pdf?src-supplier=Digi-Key; ComponentLink7URL: https://datasheet.ciiva.com/8089/tc33-8089484.pdf?src-supplier=Avnet; ComponentLink7Description: https://datasheet.ciiva.com/8089/tc33-8089484.pdf?src-supplier=Avnet; ComponentLink8URL: https://datasheet.ciiva.com/28659/1520225-28659212.pdf?src-supplier=Element14; ComponentLink8Description: https://datasheet.ciiva.com/28659/1520225-28659212.pdf?src-supplier=Element14; ComponentLink9URL: https://datasheet.ciiva.com/16802/tc33-16802397.pdf?src-supplier=Avnet+Europe; ComponentLink9Description: https://datasheet.ciiva.com/16802/tc33-16802397.pdf?src-supplier=Avnet+Europe; Supplier Part Number 1: TC33X-103ECT-ND
footprint TC33X-2-103E
pins: 1 ccw, 2 wiper, 3 cw

## TEST POINT
designator P?, comment Test Point
Test Point ON
footprint TEST POINT
pins: 1

## TF31-22S-0.5SH(800)
designator J?
CONN FFC 22POS 0.50MM SMD; Manufacturer: Hirose; Supplier 1: Digi-Key; Manufacturer Part Number: TF31-22S-0.5SH(800); RoHS: Yes; Stock 1: 14399; Pricing 1: 1=0.46000, 10=0.43100, 25=0.36920, 50=0.31360, 100=0.30140, 250=0.27060, 500=0.25830, 1000=0.21525 (USD); RoHS Compliant: No; Supplier Part Number 1: 26-TF31-22S-0.5SH(800)CT-ND
footprint TF31-22S-0.5SH(800) (CONN FFC 22POS 0.50MM SMD)
pins: 1, 2, 3, 4, 5, 6, 7, 8, 9, 10, 11, 12, 13, 14, 15, 16, 17, 18, 19, 20, 21, 22, MP1, MP2

## Through Hole PAD
designator P?
Wire Connecting Pads
footprint Through Hole PAD
pins: 1, 2

## TL3301NF160QG/TR
designator SW?, comment Tactile Switch  (value not drawn)
SWITCH TACTILE SPST-NO 0.05A 12V; Manufacturer: E-Switch; Manufacturer Part No: TL3301NF160QG/TR; Value: Custom; Package: SMD (6.00mm x 6.00mm)
footprint TL3301NF160QG/TR (Tactile Switch SPST-NO Top Actuated Surface Mount)
pins: 1, 2, 3, 4

## TNPW020150R0DEED
designator R?, comment 50R
TNPW0201 50R 0.5% T-9 ET7 E3; Manufacturer: Vishay Dale; Manufacturer Part Number: TNPW020150R0DEED; Supplier 1: Digi-Key; RoHS: Yes; Supplier Part Number 1: MP9403EN-LF-ND
footprint Res-0201
pins: 1, 2

## TPS61061DRBRG4
designator U?
IC LED DRVR RGLTR DIM 400MA 8SON; Manufacturer: Texas Instruments; Number of Outputs: 1; Output Voltage: 18.5V; Max Input Voltage: 6V; Min Input Voltage: 2.7V; Topology: Boost; Efficiency: 80%; Frequency: 1.2MHz; Max Output Current: 60mA; Number of Segments: 4; Switching Frequency: 1MHz; Quiescent Current: 1mA; Operating Frequency: 1000 kHz; Supplier 1: Digi-Key; Manufacturer Part Number: TPS61061DRBRG4; RoHS: Yes; Category: LED Drivers; Pricing 1: 3000=0.90650 (USD); Case/Package: VSON; Number of Pins: 8; Weight: 0.000847oz; Min Operating Temperature: -40°C; Max Operating Temperature: 85°C; Packaging: Tape and Reel; Output Current: 400mA; Package Quantity: 3000; Max Supply Voltage: 6V; Min Supply Voltage: 2.7V; Number of Channels: 1; Series: -; Width: 3mm; Radiation Hardening: No; Lead Free: Lead Free; RoHS Compliant: Yes; ComponentLink1URL: https://datasheet.ciiva.com/26911/getdatasheetpartid-681356-26911591.pdf?src-supplier=Verical; ComponentLink1Description: https://datasheet.ciiva.com/26911/getdatasheetpartid-681356-26911591.pdf?src-supplier=Verical; ComponentLink2URL: https://datasheet.ciiva.com/1947/tps61060-1947756.pdf?src-supplier=Digi-Key; ComponentLink2Description: https://datasheet.ciiva.com/1947/tps61060-1947756.pdf?src-supplier=Digi-Key; Supplier Part Number 1: TPS61061DRBRG4-ND
footprint TPS61061DRBRG4 (IC LED DRVR RGLTR DIM 400MA 8SON)
pins: 1 GND, 2 EN, 3 ILED, 4 FB, 5 PGND, 6 SW, 7 OUT, 8 Vin, 9 GND

## TSC2007IPWR
designator U?
IC TOUCH SCREEN 12BIT 16TSSOP; Manufacturer: Texas Instruments; Interface: I2C,Serial,4-WIRE; Max Supply Voltage: 3.6V; Min Supply Voltage: 1.2V; Operating Supply Current: 226.2uA; Resolution: 12b; Number of Bits: 12; Touchscreen: Resistive; Sampling Rate: 200KS/s; Supplier 1: Digi-Key; Manufacturer Part Number: TSC2007IPWR; RoHS: Yes; Category: Touch Screen Controllers; Stock 1: 1392; Pricing 1: 1=2.48000, 10=2.22500, 25=2.09880, 100=1.67900, 250=1.46916, 500=1.42718, 1000=1.13335 (USD); Mount: Surface Mount; Case/Package: TSSOP; Number of Pins: 16; Weight: 0.002183oz; Min Operating Temperature: -40°C; Max Operating Temperature: 85°C; Packaging: Tape and Reel; Package Quantity: 2000; Series: TSC2007; Length: 5mm; Width: 4.4mm; Height: 1.15mm; Radiation Hardening: No; Lead Free: Lead Free; RoHS Compliant: Yes; ComponentLink1URL: https://datasheet.ciiva.com/15134/getdatasheetpartid-293995-15134632.pdf?src-supplier=Verical; ComponentLink1Description: https://datasheet.ciiva.com/15134/getdatasheetpartid-293995-15134632.pdf?src-supplier=Verical; ComponentLink2URL: https://datasheet.ciiva.com/1405/tsc2007-1405302.pdf?src-supplier=Digi-Key; ComponentLink2Description: https://datasheet.ciiva.com/1405/tsc2007-1405302.pdf?src-supplier=Digi-Key; ComponentLink3URL: https://datasheet.ciiva.com/3149/tsc2007-3149590.pdf?src-supplier=Avnet; ComponentLink3Description: https://datasheet.ciiva.com/3149/tsc2007-3149590.pdf?src-supplier=Avnet; ComponentLink4URL: https://datasheet.ciiva.com/1405/tsc2007-1405303.pdf?src-supplier=Digi-Key; ComponentLink4Description: https://datasheet.ciiva.com/1405/tsc2007-1405303.pdf?src-supplier=Digi-Key; ComponentLink5URL: https://datasheet.ciiva.com/1405/tsc2007-1405215.pdf?src-supplier=Digi-Key; ComponentLink5Description: https://datasheet.ciiva.com/1405/tsc2007-1405215.pdf?src-supplier=Digi-Key; ComponentLink6URL: https://datasheet.ciiva.com/41460/001186269-da-01-en-ic-touch-screen-tsc2007ipwr-tssop-16-tid-41460204.pdf?src-supplier=Conrad; ComponentLink6Description: https://datasheet.ciiva.com/41460/001186269-da-01-en-ic-touch-screen-tsc2007ipwr-tssop-16-tid-41460204.pdf?src-supplier=Conrad; Supplier Part Number 1: 296-27124-1-ND
footprint 16-TSSOP
pins: 1 VDD/REF, 2 X+, 3 Y+, 4 X-, 5 Y-, 6 GND, 7 NC, 8 NC, 9 NC, 10 ~{PENIRQ}, 11 SDA, 12 SCL, 13 A1, 14 A0, 15 NC, 16 AUX

## TSM-104-01-F-SV-P-TR
designator J?
CONN HEADER SMD 4POS 2.54MM; Manufacturer: Samtec; Gender: Male; Number of Contacts: 4; Supplier 1: Digi-Key; Manufacturer Part Number: TSM-104-01-F-SV-P-TR; RoHS: No; Category: Headers and Wire Housings; Stock 1: 425; Pricing 1: 1=1.19000, 10=1.04600, 100=0.90200 (USD); Contact Plating: Gold; Termination: Solder; Number of Rows: 1; Packaging: Tape and Reel; Pitch: 2.54mm; Radiation Hardening: No; Lead Free: Lead Free; ComponentLink1URL: http://www.samtec.com/documents/webfiles/pdf/TSM.PDF?src-supplier=Avnet; ComponentLink1Description: http://www.samtec.com/documents/webfiles/pdf/TSM.PDF?src-supplier=Avnet; Supplier Part Number 1: SAM14812CT-ND
footprint TSM-104-01-F-SV-P-TR
pins: 1, 2, 3, 4

## U.FL-R-SMT-1(80)
designator J?
CONN U.FL RCPT STR 50 OHM SMD; Manufacturer: Hirose; Supplier 1: Future Electronics; Manufacturer Part Number: U.FL-R-SMT-1(80); Stock 1: 1272; Pricing 1: 1=1.07, 500=0.785, 1500=0.74, 2500=0.72, 5000=0.695 (USD); Case/Package: SMD/SMT; Package Quantity: 10000; Packaging: Tape and Reel; Lead Free: Lead Free; ComponentLink1URL: https://www.hirose.com/product/en/download_file/key_name/U.FL-R-SMT-1%2880%29/category/Specification%20Sheet/doc_file_id/37638/?file_category_id=9&item_id=03310472280&is_series=&src-supplier=Digi-Key; ComponentLink1Description: https://www.hirose.com/product/en/download_file/key_name/U.FL-R-SMT-1%2880%29/category/Specification%20Sheet/doc_file_id/37638/?file_category_id=9&item_id=03310472280&is_series=&src-supplier=Digi-Key; ComponentLink2URL: http://www.mouser.com/ds/2/185/U.FL_catalog-939761.pdf?src-supplier=Mouser; ComponentLink2Description: http://www.mouser.com/ds/2/185/U.FL_catalog-939761.pdf?src-supplier=Mouser; Supplier Part Number 1: U.FL-R-SMT-1(80)-CUTT
footprint U.FL-R-SMT-1(80)
pins: 1 RF_IN, 2 GND, 3 GND

## UC200T
designator U?
UMTS/HSPA+ Module; Manufacturer: Quectel; Value: Custom; Manufacturer Part No: UC200T; Package: Custom
footprint UC200T
part A pins: 7 VDD_EXT, 10 USIM_GND, 11 DBG_RXD , 12 DBG_TXD, 13 USIM_DET , 14 USIM_VDD , 15 USIM_DATA , 16 USIM_CLK , 17 USIM_RST , 20 RESET_N , 21 PWRKEY, 41 I2C_SCL , 42 I2C_SDA , 44 ADC1, 45 ADC0, 49 ANT_MAIN , 57 VBAT_RF , 58 VBAT_RF , 59 VBAT_BB , 60 VBAT_BB , 61 STATUS, 69 USB_DP , 70 USB_DM , 71 USB_VBUS , 115 FORCE_USB _BOOT
part B pins: 1 WAKEUP_IN , 2 AP_READY , 4 W_DISABLE# , 5 NET_MODE , 6 NET_STATUS , 23 SD_DET , 24 PCM_DIN , 25 PCM_DOUT , 26 PCM_SYNC , 27 PCM_CLK , 28 SD_SDIO_ DATA3 , 29 SD_SDIO_ DATA2 , 30 SD_SDIO_ DATA1 , 31 SD_SDIO_ DATA0, 32 SD_SDIO_ CLK, 33 SD_SDIO_ CMD, 34 SD_SDIO_ VDD, 62 MAIN_RI , 63 MAIN_DCD , 64 MAIN_CTS , 65 MAIN_RTS , 66 MAIN_DTR , 67 MAIN_TXD , 68 MAIN_RXD 
part C pins: 3 RESERVED, 18 RESERVED, 35 RESERVED, 37 RESERVED, 38 RESERVED, 39 RESERVED, 40 RESERVED, 43 RESERVED, 47 RESERVED, 55 RESERVED, 113 RESERVED, 114 RESERVED, 116 RESERVED, 141 RESERVED, 142 RESERVED, 143 RESERVED, 144 RESERVED
part D pins: 8 GND , 9 GND , 19 GND, 22 GND , 36 GND , 46 GND , 48 GND , 50 GND , 51 GND , 52 GND , 53 GND , 54 GND , 56 GND , 72 GND , 85 GND , 86 GND , 87 GND , 88 GND , 89 GND , 90 GND , 91 GND , 92 GND , 93 GND , 94 GND , 95 GND , 96 GND , 97 GND , 98 GND , 99 GND , 100 GND , 101 GND , 102 GND , 103 GND , 104 GND , 105 GND , 106 GND , 107 GND , 108 GND , 109 GND , 110 GND , 111 GND , 112 GND 

## VEML6030-GS15
designator U?
SENSOR OPT 550NM AMBIENT 6SMD; Manufacturer: Vishay Semiconductors; Output Type: I2C; Supplier 1: Digi-Key; Manufacturer Part Number: VEML6030-GS15; RoHS: Yes; Category: Sensors; Stock 1: 1250; Pricing 1: 1=2.00000, 5=1.89000, 10=1.62000, 25=1.29600, 50=1.18800, 100=1.08000, 500=0.94500, 1000=0.83700, 5000=0.78300 (USD); Mount: Surface Mount; Case/Package: SMD/SMT; Min Operating Temperature: -25°C; Max Operating Temperature: 85°C; Packaging: Tape and Reel; Wavelength: 550nm; RoHS Compliant: Yes; ComponentLink1URL: http://www.vishay.com/docs/84366/veml6030.pdf?src-supplier=Digi-Key; ComponentLink1Description: http://www.vishay.com/docs/84366/veml6030.pdf?src-supplier=Digi-Key; Supplier Part Number 1: VEML6030-GS15CT-ND
footprint 6-SMD
pins: 1 GND, 2 SDA, 3 INT, 4 ADDR, 5 SCL, 6 VDD